# Altium schematic symbol library DT10965_MOTOR_CONTROLLER.SCHLIB: 85 symbols (part 2 of 2)
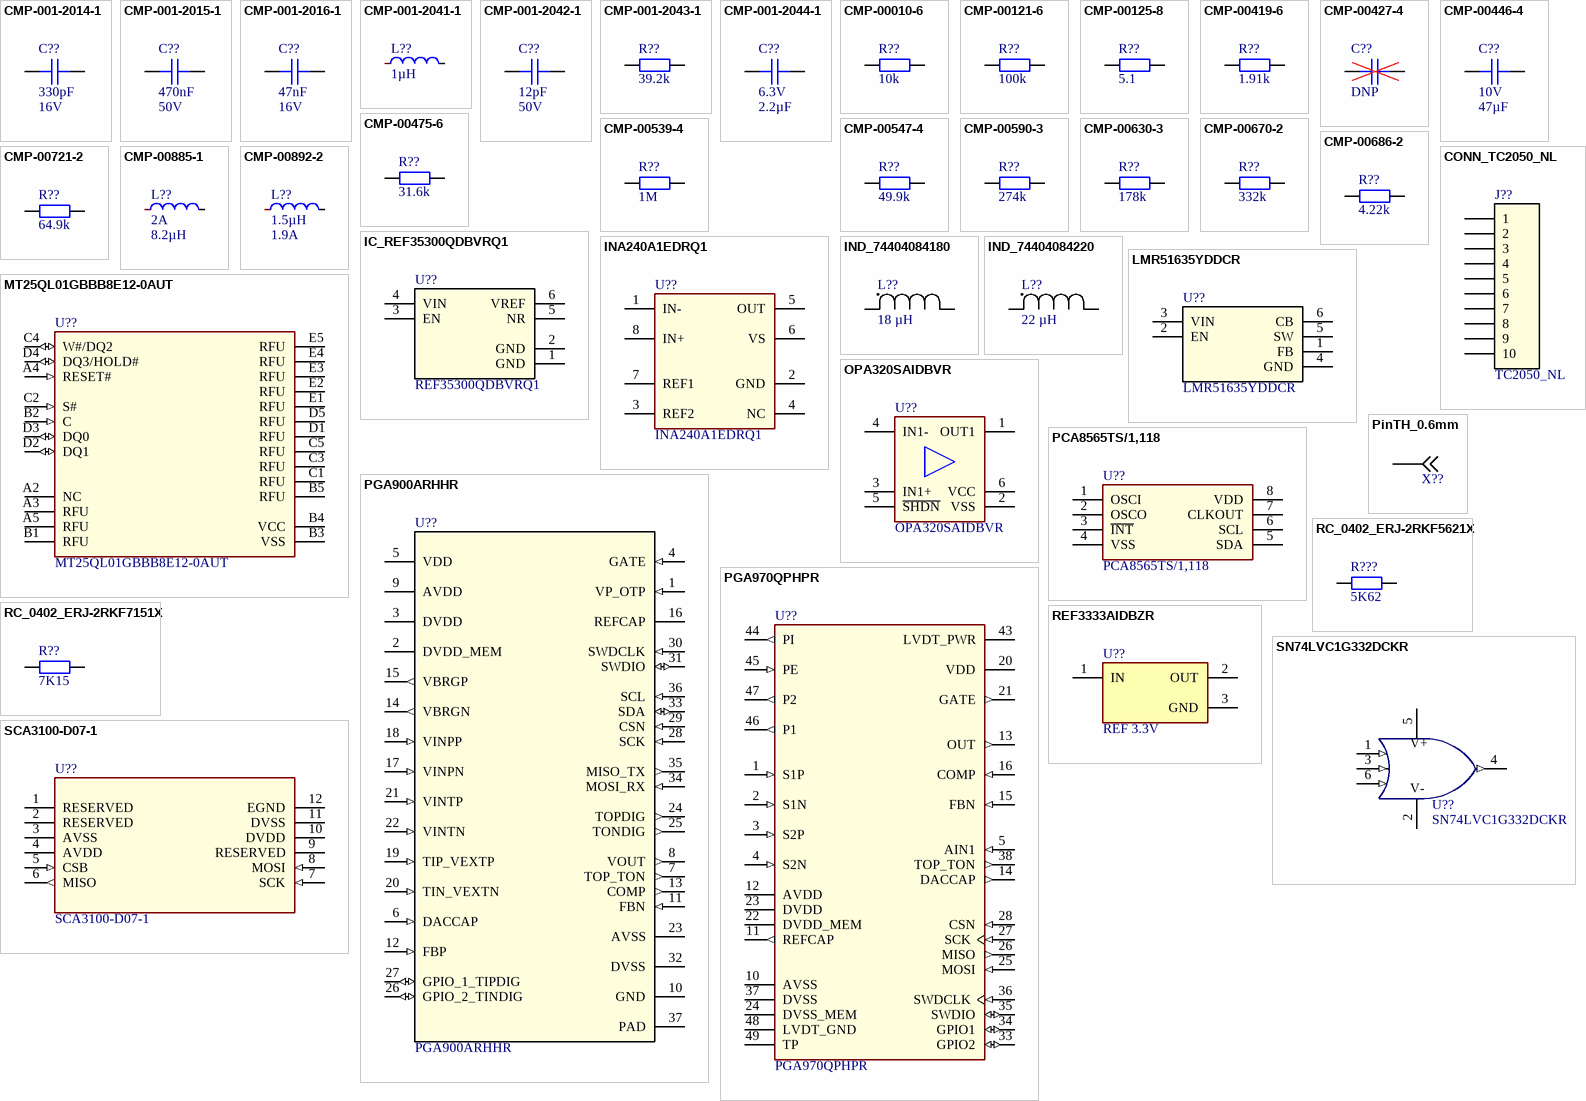
[diagram p3: symbols CMP-001-2014-1 to SN74LVC1G332DCKR]

## CMP-00670-2
designator R??, comment Resistance: 332k  (hidden comment: RC0402FR-07332KL)
RES 332K OHM 1% 1/16W 0402; Manufacturer: YAGEO; Op Temp max: 155°C; Temperature Coefficient: ±100ppm; Power: 63mW; Op Temp min: -55°C; Size: 1.00mm x 0.50mm; ComponentLink1Description: Datasheet; Composition: Thick Film; Package: 0402 (1005 Metric); Height max: 400µm; Ratings: -; ComponentLink2Description: Mouser; ComponentLink3Description: Digikey; MPN: RC0402FR-07332KL; ComponentLink1URL: https://www.yageo.com/upload/media/product/productsearch/datasheet/rchip/PYu-RC_Group_51_RoHS_L_12.pdf; ComponentLink2URL: https://eu.mouser.com/ProductDetail/YAGEO/RC0402FR-07332KL?qs=5YWhraou11DzMN0bHRRHtQ%3D%3D; ComponentLink3URL: https://www.digikey.com/en/products/detail/yageo/RC0402FR-07332KL/726595?s=N4IgTCBcDaIEoGEAMAWJYBicC0SDsAzAWANIAyIAugL5A; Mounting Type: SM; Tolerance: 1%; Component Type: Chip Resistor
footprint RESC100X50X40L25 (EIA 0402 (1005) T0.40 1.00x0.50x0.40)
pins: 1, 2

## CMP-00686-2
designator R??, comment Resistance: 4.22k  (hidden comment: RC0402FR-074K22L)
RES 4.22K OHM 1% 1/16W 0402; Manufacturer: YAGEO; Temperature Coefficient: ±100ppm; Op Temp max: 155°C; Op Temp min: -55°C; Power: 63mW; Height max: 400µm; Tolerance: 1%; Mounting Type: SM; ComponentLink2URL: https://eu.mouser.com/ProductDetail/YAGEO/RC0402FR-074K22L?qs=UOUeRUa%252B8WlIkeLfnYGqDQ%3D%3D; ComponentLink3URL: https://www.digikey.com/en/products/detail/yageo/RC0402FR-074K22L/5281032?s=N4IgTCBcDaIEoGEAMAWJYBicC0SDsKA0mGADIgC6AvkA; ComponentLink2Description: Mouser; Package: 0402 (1005 Metric); ComponentLink3Description: Digikey; MPN: RC0402FR-074K22L; Ratings: -; ComponentLink1Description: Datasheet; ComponentLink1URL: https://www.yageo.com/upload/media/product/productsearch/datasheet/rchip/PYu-RC_Group_51_RoHS_L_12.pdf; Composition: Thick Film; Size: 1.00mm x 0.50mm; Component Type: Chip Resistor
footprint RESC100X50X40L25 (EIA 0402 (1005) T0.40 1.00x0.50x0.40)
pins: 1, 2

## CMP-00721-2
designator R??, comment Resistance: 64.9k  (hidden comment: RC0402FR-0764K9L)
RES 64.9K OHM 1% 1/16W 0402; Manufacturer: YAGEO; Temperature Coefficient: ±100ppm; Op Temp min: -55°C; Power: 63mW; Op Temp max: 155°C; Tolerance: 1%; Package: 0402 (1005 Metric); ComponentLink2URL: https://eu.mouser.com/ProductDetail/YAGEO/RC0402FR-0764K9L?qs=Is6ZsIPfHkbVUkOpst8WdA%3D%3D; MPN: RC0402FR-0764K9L; ComponentLink1URL: https://www.yageo.com/upload/media/product/productsearch/datasheet/rchip/PYu-RC_Group_51_RoHS_L_12.pdf; ComponentLink2Description: Mouser; ComponentLink3Description: Digikey; ComponentLink3URL: https://www.digikey.com/en/products/detail/yageo/RC0402FR-0764K9L/726649?s=N4IgTCBcDaIEoGEAMAWJYBicC0SDsAbCgNICcAMiALoC%2BQA; Composition: Thick Film; ComponentLink1Description: Datasheet; Mounting Type: SM; Ratings: -; Size: 1.00mm x 0.50mm; Height max: 400µm; Component Type: Chip Resistor
footprint RESC100X50X40L25 (EIA 0402 (1005) T0.40 1.00x0.50x0.40)
pins: 1, 2

## CMP-00885-1
designator L??, comment I: 2A  Inductance: 8.2µH  (hidden comment: SRP4020TA-8R2M)
FIXED IND 8.2UH 2A 180 MOHM SMD; Manufacturer: Bourns Inc.; Type: Drum Core, Wirewound; Op Temp min: -40°C; Material - Core: Carbonyl Powder; DCR: 0.18; Op Temp max: 150°C; Tolerance: 20%; Isat: 2.5A; Fsr: 21MHz; Shielding: Shielded; Ratings: AEC-Q200; ComponentLink3Description: Digikey; ComponentLink2Description: Mouser; Height max: 2mm; Lead Spacing: 0mm; ComponentLink1Description: Datasheet; Package: 2-SMD; ComponentLink3URL: https://www.digikey.com/en/products/detail/bourns-inc/SRP4020TA-8R2M/4901009?s=N4IgTCBcDaIMoCUAKAWADGNAVAggWgA4EwBZEAXQF8g; ComponentLink2URL: https://eu.mouser.com/ProductDetail/Bourns/SRP4020TA-8R2M?qs=Ph8%2FHnX6CQwwXiBs8JjSfQ%3D%3D; Size: 4.45mm x 4.06mm; MPN: SRP4020TA-8R2M; ComponentLink1URL: https://www.bourns.com/docs/Product-Datasheets/SRP4020TA.pdf; Mounting Type: SM; Component Type: Fixed Inductors
footprint BOURNS_SRP4020TA (Inductor 4.45x4.06 h2.00 Bourns Inc.)
pins: 1, 2

## CMP-00892-2
designator L??, comment Inductance: 1.5µH  I: 1.9A  (hidden comment: VLS201612CX-1R5M-1)
FIXED IND 1.5UH 1.9A 89MOHM SMD; Manufacturer: TDK Corporation; Op Temp max: 105°C; Shielding: Shielded; DCR: 89m; Type: Drum Core, Wirewound; Material - Core: Ferrite; Tolerance: 20%; Op Temp min: -40°C; Fsr: 0Hz; Isat: 1.62A; Height max: 1.2mm; Size: 2.00mm x 1.60mm; ComponentLink3URL: https://www.digikey.com/en/products/detail/tdk-corporation/VLS201612CX-1R5M-1/5169766; ComponentLink2Description: Mouser; ComponentLink1Description: Datasheet; Mounting Type: SM; Lead Spacing: 0mm; MPN: VLS201612CX-1R5M-1; ComponentLink3Description: Digikey; Package: Nonstandard; ComponentLink2URL: https://eu.mouser.com/ProductDetail/TDK/VLS201612CX-1R5M-1?qs=1mbolxNpo8ckwscKPJipMQ%3D%3D; Ratings: -; ComponentLink1URL: https://product.tdk.com/en/search/inductor/inductor/smd/info?part_no=VLS201612CX-1R5M-1&utm_source=inductor_commercial_power_vls201612cx-1_en.pdf&utm_medium=catalog; Component Type: Fixed Inductors
footprint TDK_VLS201612 (Inductor 2.00x1.60 h1.20 TDK Corporation)
pins: 1, 2

## CONN_TC2050_NL
designator J??, comment TC2050_NL
PLUG-OF-NAILS 10-PIN W/O LEGS 8"; Manufacturer: Tag-Connect LLC; MPN: TC2050; Series: Plug-Of-Nails™; ComponentLink1Description: Datasheet; ComponentLink1URL: https://www.tag-connect.com/wp-content/uploads/bsk-pdf-manager/TC2050-IDC-NL_Datasheet_8.pdf; ComponentLink2Description: DigiKey; ComponentLink2URL: https://www.digikey.pl/en/products/detail/tag-connect-llc/TC2030-IDC/4571121
footprint CONN__TAG_TC2050-IDC-NL
pins: 1, 2, 3, 4, 5, 6, 7, 8, 9, 10

## IC_REF35300QDBVRQ1
designator U??, comment REF35300QDBVRQ1
IC VREF SERIES SOT23-6; Mfr_Name: Texas Instruments; Output Type: Fixed; Voltage - Output (Min/Fixed): 3V; Current - Output: 10 mA; Tolerance: ±0.05%; Temperature Coefficient: 15ppm/°C; Noise - 0.1Hz to 10Hz: 3.8ppmp-p; Noise - 10Hz to 10kHz: 0.7ppmrms; Voltage - Input: 3.25V ~ 6V; Current - Supply: 2.6µA; MPN: REF35300QDBVRQ1; Reference Type: Series; ComponentLink1Description: Datasheet; ComponentLink1URL: https://www.ti.com/lit/ds/symlink/ref35-q1.pdf?ts=1750582135074&ref_url=https%253A%252F%252Fwww.ti.com%252Fproduct%252FREF35-Q1; ComponentLink2Description: DigiKey; ComponentLink2URL: https://www.digikey.com/en/products/detail/texas-instruments/REF35300QDBVRQ1/21598116?s=N4IgTCBcDaIEoFEBiBmArCgDJgigEQCEA1OHARgAIQBdAXyA; ComponentLink3Description: Mouser; ComponentLink3URL: https://eu.mouser.com/ProductDetail/Texas-Instruments/REF35300QDBVRQ1?qs=HoCaDK9Nz5eVknlU2N7cQg%3D%3D; Operating Temperature (MIN): -40°C (TA); Operating Temperature (MAX): +125°C (TA); Ratings: AEC-Q100; Mounting Type: SM; Package / Case: SOT-23-6
footprint SOT23-6_DBV_TEX
pins: 1 GND, 2 GND, 3 EN, 4 VIN, 5 NR, 6 VREF

## INA240A1EDRQ1
designator U??
IC CURRENT SENSE 1 CIRCUIT 8SOIC; Manufacturer: Texas Instruments; MPN: INA240A1EDRQ1
footprint SOIC8P127_490X600X175L70X41 (SO-8 4.9X6X1.75 p1.27 (JEDEC MS-012-AA))
pins: 1 IN-, 2 GND, 3 REF2, 4 NC, 5 OUT, 6 VS, 7 REF1, 8 IN+

## IND_74404084180
designator L??, comment Inductance: 18 µH  (hidden comment: 74404084180)
FIXED IND 18UH 2.4A 53 MOHM SMD; Manufacturer: Würth Elektronik; Current - Saturation (Isat): 3.2A; Shielding: Shielded; DC Resistance (DCR): 53mOhm; Frequency - Self Resonant: 16.5MHz; Inductance Frequency - Test: 100 kHz; Type: Drum Core, Wirewound; Material - Core: Ferrite; Tolerance: ±20%; MPN: 74404084180; Current Rating (Amps): 2.4 A; ComponentLink1Description: DigiKey; ComponentLink1URL: https://www.digikey.at/en/products/detail/w%C3%BCrth-elektronik/74404084180/4865714; ComponentLink2Description: Datasheet; ComponentLink2URL: https://www.we-online.com/components/products/datasheet/74404084180.pdf; Mounting Type: SM; Ratings: AEC-Q200; Q @ Freq: -; ComponentLink3Description: Mouser; ComponentLink3URL: https://eu.mouser.com/ProductDetail/Wurth-Elektronik/74404084180?qs=Zt3UNFD9mQi7%2FFsJHsfi3g%3D%3D; Size / Dimension: 8.00mm x 8.00mm); Height - Seated (Max: 4.20mm
footprint WE-LQS_8040 (SMD Power Inductor, 2-Leads, body 8x8mm)
pins: 1, 2

## IND_74404084220
designator L??, comment Inductance: 22 µH  (hidden comment: 74404084220)
FIXED IND 22UH 2.1A 69 MOHM SMD; Manufacturer: Würth Elektronik; Current - Saturation (Isat): 3.3A; Shielding: Shielded; DC Resistance (DCR): 69mOhm; Frequency - Self Resonant: 9.5MHz; Inductance Frequency - Test: 100 kHz; Type: Drum Core, Wirewound; Material - Core: Ferrite; Tolerance: ±20%; MPN: 74404084220; Current Rating (Amps): 2.1 A; ComponentLink1Description: DigiKey; ComponentLink1URL: https://www.digikey.at/en/products/detail/w%C3%BCrth-elektronik/74404084220/4865715; ComponentLink2Description: Datasheet; ComponentLink2URL: https://www.we-online.com/components/products/datasheet/74404084180.pdf; Mounting Type: SM; Ratings: AEC-Q200; Q @ Freq: -; ComponentLink3Description: Mouser; ComponentLink3URL: https://eu.mouser.com/ProductDetail/Wurth-Elektronik/74404084220?qs=Zt3UNFD9mQj6g2r9g%252BlaYA%3D%3D; Size / Dimension: 8.00mm x 8.00mm); Height - Seated (Max: 4.20mm
footprint WE-LQS_8040 (SMD Power Inductor, 2-Leads, body 8x8mm)
pins: 1, 2

## LMR51635YDDCR
designator U??
SIMPLE SWITCHER SYNCHRONOUS BUCK; Manufacturer: Texas Instruments; Function: Step-Down; Output Type: Adjustable; Voltage - Input (Min): 4.3V; Voltage - Input (Max): 60V; Voltage - Output (Min/Fixed): 0.8V; Voltage - Output (Max): 30V; Current - Output: 3.5A; Frequency - Switching: 1.1MHz; Synchronous Rectifier: Yes; MPN: LMR51635YDDCR; Topology: Buck; Operating Temperature (MIN): -40°C  (TJ); Operating Temperature (MAX): 150°C (TJ); Mounting Type: SM; Package / Case: SOT-23-6 Thin, TSOT-23-6; ComponentLink1Description: Datasheet; ComponentLink1URL: https://www.ti.com/lit/ds/symlink/lmr51625.pdf?ts=1742888310253&ref_url=https%253A%252F%252Fwww.ti.com%252Fsitesearch%252Fen-us%252Fdocs%252Funiversalsearch.tsp%253FlangPref%253Den-US%2526nr%253D3%2526searchTerm%253DLMR51625XDDCR; ComponentLink2Description: DigiKey; ComponentLink2URL: https://www.digikey.at/en/products/detail/texas-instruments/LMR51635YDDCR/25991362?s=N4IgTCBcDaIDIFkBKBWAjANgMwoJoBF8BhJEAXQF8g; ComponentLink3Description: Mouser; ComponentLink3URL: https://eu.mouser.com/ProductDetail/Texas-Instruments/LMR51635YDDCR?qs=efUn273yAhf6vdsp91a46w%3D%3D
footprint DDC0006A-MFG
pins: 1 FB, 2 EN, 3 VIN (power), 4 GND (power), 5 SW (power), 6 CB (power)

## MT25QL01GBBB8E12-0AUT
designator U??
IC FLASH 1GBIT SPI 24TPBGA; Manufacturer: Micron Technology Inc.; MPN: MT25QL01GBBB8E12-0AUT
footprint 24-T-PBGA (6x8)
pins: A2 NC, A3 RFU, A4 RESET# (in), A5 RFU, B1 RFU, B2 C (in), B3 VSS (power), B4 VCC (power), B5 RFU, C1 RFU, C2 S# (in), C3 RFU, C4 W#/DQ2 (io), C5 RFU, D1 RFU, D2 DQ1 (io), D3 DQ0 (io), D4 DQ3/HOLD# (io), D5 RFU, E1 RFU, E2 RFU, E3 RFU, E4 RFU, E5 RFU

## OPA320SAIDBVR
designator U??
CMOS Amplifier 1 Circuit Rail-to-Rail SOT-23-6; Manufacturer: Texas Instruments; MPN: OPA320SAIDBVR
footprint SOT-23-6
pins: 1 OUT1, 2 VSS, 3 IN1+, 4 IN1-, 5 ~{SHDN}, 6 VCC

## PCA8565TS/1,118
designator U??
IC RTC CLK/CALENDAR I2C 8TSSOP; Manufacturer: NXP USA Inc.; MPN: PCA8565TS/1,118
footprint MINISOIC-8 (MINISOIC, 8-Leads, Body 3,00x3,00mm, Pitch 0,65mm, IPC Medium Density)
pins: 1 OSCI, 2 OSCO, 3 ~{INT}, 4 VSS, 5 SDA, 6 SCL, 7 CLKOUT, 8 VDD

## PGA900ARHHR
designator U??
IC PROG SENSOR SGNL COND 36VQFN; Manufacturer: Texas Instruments; MPN: PGA900ARHHR
footprint 36VQFN (PGA900ARHHR)
pins: 1 VP_OTP (in), 2 DVDD_MEM (power), 3 DVDD (power), 4 GATE (in), 5 VDD (power), 6 DACCAP (in), 7 TOP_TON (out), 8 VOUT (out), 9 AVDD (power), 10 GND (power), 11 FBN (in), 12 FBP (in), 13 COMP (out), 14 VBRGN (out), 15 VBRGP (out), 16 REFCAP, 17 VINPN (in), 18 VINPP (in), 19 TIP_VEXTP (in), 20 TIN_VEXTN (in), 21 VINTP (in), 22 VINTN (in), 23 AVSS (power), 24 TOPDIG (out), 25 TONDIG (out), 26 GPIO_2_TINDIG (io), 27 GPIO_1_TIPDIG (io), 28 SCK (in), 29 CSN (in), 30 SWDCLK (in), 31 SWDIO (io), 32 DVSS (power), 33 SDA (io), 34 MOSI_RX (in), 35 MISO_TX (out), 36 SCL (in), 37 PAD (power)

## PGA970QPHPR
designator U??
IC SGNL CONDITIONER LVDT 48HTQFP; Manufacturer: Texas Instruments; MPN: PGA970QPHPR
footprint 48-HTQFP (7x7)
pins: 1 S1P (in), 2 S1N (in), 3 S2P (in), 4 S2N (in), 5 AIN1 (in), 10 AVSS (power), 11 REFCAP (out), 12 AVDD (power), 13 OUT (out), 14 DACCAP (out), 15 FBN (in), 16 COMP (in), 20 VDD (power), 21 GATE (out), 22 DVDD_MEM (power), 23 DVDD (power), 24 DVSS_MEM (power), 25 MOSI (in), 26 MISO (out), 27 SCK (in), 28 CSN (in), 33 GPIO2 (io), 34 GPIO1 (io), 35 SWDIO (io), 36 SWDCLK (in), 37 DVSS (power), 38 TOP_TON (out), 43 LVDT_PWR (power), 44 PI (out), 45 PE (in), 46 P1 (out), 47 P2 (out), 48 LVDT_GND (power), 49 TP (power)

## PinTH_0.6mm
designator X??, comment PIN-TH-0.6mm  (value not drawn)
Pin 0.6mm diameter for 26AWG; Current Rating (Amps): 3A; Voltage Rating: 250V; ComponentLink1Description: DigiKey; ComponentLink2Description: Datasheet; Termination: Solder; Mounting Type: TH; Diameter: 0.6mm; Contact Type: Male Pin; ComponentLink3Description: Mouser
footprint PIN-TH-0.6mm
pins: 1

## RC_0402_ERJ-2RKF5621X
designator R???, comment Resistance: 5K62  (hidden comment: ERJ-2RKF5621X)
RES SMD 5.62K OHM 1% 1/10W 0402; Manufacturer: Panasonic Electronic Components; Temperature Coefficient: ±100ppm/°C; Power: 0.1W, 1/10W; Op Temp min: -55°C; Op Temp max: 155°C; Ratings: Automotive AEC-Q200; Package: 0402 (1005 Metric); MPN: ERJ-2RKF5621X; Size: 1.00mm x 0.50mm; ComponentLink1Description: Datasheet; ComponentLink3Description: Digikey; ComponentLink2URL: https://eu.mouser.com/ProductDetail/Panasonic/ERJ-2RKF5621X?qs=YMBIwoNQYdVW%2FAKb0KIR9A%3D%3D; Mounting Type: SM; Composition: Thick Film; ComponentLink3URL: https://www.digikey.at/en/products/detail/panasonic-electronic-components/ERJ-2RKF5621X/192390?s=N4IgTCBcDaIKICUBSBaMCDSAxArANjAEYANEAXQF8g; Tolerance: 1%; Height max: 0.40mm; ComponentLink2Description: Mouser; ComponentLink1URL: https://industrial.panasonic.com/cdbs/www-data/pdf/RDA0000/AOA0000C304.pdf; Component Type: Chip Resistor
footprint RC0402N_PAN
pins: 1, 2

## RC_0402_ERJ-2RKF7151X
designator R??, comment Resistance: 7K15  (hidden comment: ERJ-2RKF7151X)
RES SMD 7.15K OHM 1% 1/10W 0402; Manufacturer: Panasonic Electronic Components; Temperature Coefficient: ±100ppm/°C; Power: 0.1W, 1/10W; Op Temp min: -55°C; Op Temp max: 155°C; Ratings: Automotive AEC-Q200; Package: 0402 (1005 Metric); MPN: ERJ-2RKF7151X; Size: 1.00mm x 0.50mm; ComponentLink1Description: Datasheet; ComponentLink3Description: Digikey; ComponentLink2URL: https://eu.mouser.com/ProductDetail/Panasonic/ERJ-2RKF7151X?qs=iBwFsHVUAOeT%2FIodbHv05A%3D%3D; Mounting Type: SM; Composition: Thick Film; ComponentLink3URL: https://www.digikey.at/en/products/detail/panasonic-electronic-components/ERJ-2RKF7151X/192455?s=N4IgTCBcDaIKICUBSBaMCDSAxA7ARgFY8ANEAXQF8g; Tolerance: 1%; Height max: 0.40mm; ComponentLink2Description: Mouser; ComponentLink1URL: https://industrial.panasonic.com/cdbs/www-data/pdf/RDA0000/AOA0000C304.pdf; Component Type: Chip Resistor
footprint RC0402N_PAN
pins: 1, 2

## REF3333AIDBZR
designator U??, comment REF 3.3V
IC VREF SERIES 0.15% SOT23-3; Manufacturer: Texas Instruments; MPN: REF3333AIDBZR
footprint SOT-23
pins: 1 IN, 2 OUT, 3 GND

## SCA3100-D07-1
designator U??
ACCELEROMETER 6G SPI 12SMD; Manufacturer: Murata Electronics; MPN: SCA3100-D07-1
footprint SCA3100-D07-1 (12-SMD)
pins: 1 RESERVED (power), 2 RESERVED (power), 3 AVSS (power), 4 AVDD (power), 5 CSB (in), 6 MISO (out), 7 SCK (in), 8 MOSI (in), 9 RESERVED, 10 DVDD (power), 11 DVSS (power), 12 EGND (power)

## SN74LVC1G332DCKR
designator U??
IC GATE OR 1CH 3-INP SC70-6; Manufacturer: Texas Instruments; MPN: SN74LVC1G332DCKR
footprint SC70-6 (SC70-6, 6-Leads, Body 2,00x2,10mm, Pitch 0,65mm, IPC Medium Density)
pins: 1 A (in), 2 GND (power), 3 B (in), 4 Y (out), 5 VCC (power), 6 C (in)
text: V+; V-

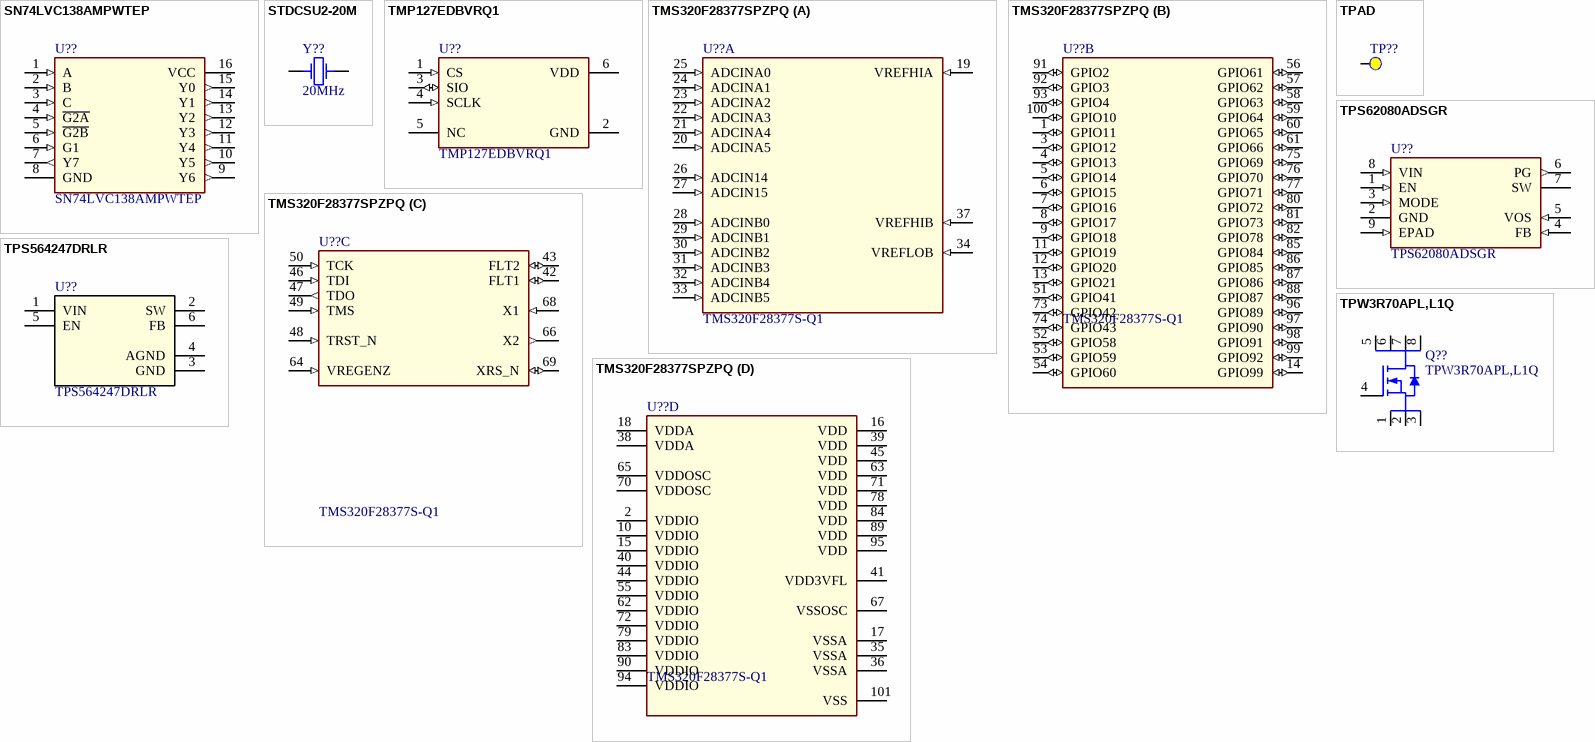
[diagram p2: symbols SN74LVC138AMPWTEP to TPW3R70APL,L1Q]

## SN74LVC138AMPWTEP
designator U??
IC DECODER/DEMUX 1X3:8 16-TSSOP; Manufacturer: Texas Instruments; MPN: SN74LVC138AMPWTEP
footprint TSSOP16
pins: 1 A (in), 2 B (in), 3 C (in), 4 ~{G2A} (in), 5 ~{G2B} (in), 6 G1 (in), 7 Y7 (out), 8 GND (power), 9 Y6 (out), 10 Y5 (out), 11 Y4 (out), 12 Y3 (out), 13 Y2 (out), 14 Y1 (out), 15 Y0 (out), 16 VCC (power)

## STDCSU2-20M
designator Y??, comment 20MHz
CRYSTAL 20.0000MHZ 8PF SMD; Manufacturer: NDK (NIHON DEMPA KOGYO CO., LTD); MPN: STDCSU2-20M
footprint NX5032GA
pins: 1, 2

## TMP127EDBVRQ1
designator U??
AUTOMOTIVE 0.8C SPI TEMPERATURE; Manufacturer: Texas Instruments; MPN: TMP127EDBVRQ1
footprint SOT-23-6
pins: 1 CS (in), 2 GND (power), 3 SIO (io), 4 SCLK (in), 5 NC, 6 VDD (power)

## TMS320F28377SPZPQ
designator U??, comment TMS320F28377S-Q1
IC MCU 32BIT 1MB FLASH 100HTQFP; MPN: TMS320F28377SPZPQ; Manufacturer: Texas Instruments
footprint 100-HTQFP (14x14)
part A pins: 19 VREFHIA (in), 20 ADCINA5 (in), 21 ADCINA4 (in), 22 ADCINA3 (in), 23 ADCINA2 (in), 24 ADCINA1 (in), 25 ADCINA0 (in), 26 ADCIN14 (in), 27 ADCIN15 (in), 28 ADCINB0 (in), 29 ADCINB1 (in), 30 ADCINB2 (in), 31 ADCINB3 (in), 32 ADCINB4 (in), 33 ADCINB5 (in), 34 VREFLOB (in), 37 VREFHIB (in)
part B pins: 1 GPIO11 (io), 3 GPIO12 (io), 4 GPIO13 (io), 5 GPIO14 (io), 6 GPIO15 (io), 7 GPIO16 (io), 8 GPIO17 (io), 9 GPIO18 (io), 11 GPIO19 (io), 12 GPIO20 (io), 13 GPIO21 (io), 14 GPIO99 (io), 51 GPIO41 (io), 52 GPIO58 (io), 53 GPIO59 (io), 54 GPIO60 (io), 56 GPIO61 (io), 57 GPIO62 (io), 58 GPIO63 (io), 59 GPIO64 (io), 60 GPIO65 (io), 61 GPIO66 (io), 73 GPIO42 (io), 74 GPIO43 (io), 75 GPIO69 (io), 76 GPIO70 (io), 77 GPIO71 (io), 80 GPIO72 (io), 81 GPIO73 (io), 82 GPIO78 (io), 85 GPIO84 (io), 86 GPIO85 (io), 87 GPIO86 (io), 88 GPIO87 (io), 91 GPIO2 (io), 92 GPIO3 (io), 93 GPIO4 (io), 96 GPIO89 (io), 97 GPIO90 (io), 98 GPIO91 (io), 99 GPIO92 (io), 100 GPIO10 (io)
part C pins: 42 FLT1 (io), 43 FLT2 (io), 46 TDI (in), 47 TDO (out), 48 TRST_N (in), 49 TMS (in), 50 TCK (in), 64 VREGENZ (in), 66 X2 (out), 68 X1 (in), 69 XRS_N (io)
part D pins: 2 VDDIO (power), 10 VDDIO (power), 15 VDDIO (power), 16 VDD (power), 17 VSSA (power), 18 VDDA (power), 35 VSSA (power), 36 VSSA (power), 38 VDDA (power), 39 VDD (power), 40 VDDIO (power), 41 VDD3VFL (power), 44 VDDIO (power), 45 VDD (power), 55 VDDIO (power), 62 VDDIO (power), 63 VDD (power), 65 VDDOSC (power), 67 VSSOSC (power), 70 VDDOSC (power), 71 VDD (power), 72 VDDIO (power), 78 VDD (power), 79 VDDIO (power), 83 VDDIO (power), 84 VDD (power), 89 VDD (power), 90 VDDIO (power), 94 VDDIO (power), 95 VDD (power), 101 VSS (power)

## TPAD
designator TP??  (value not drawn)  (no BOM)
Test Pad, SMD; Group: Test point
footprint PAD_2.0R (Pad, SMD, R=2.0 mm)
footprint PAD_1.5R (Pad, SMD, R=1.5 mm)
footprint PAD_1.0R (Pad, SMD, R=1.0 mm)
footprint PAD_1.5x1.5 (Pad, SMD, 1.5x1.5 mm)
pins: 1 TPoint

## TPS62080ADSGR
designator U??
IC REG BUCK ADJ 1.2A 8WSON; Manufacturer: Texas Instruments; MPN: TPS62080ADSGR
footprint WSON (8) 2*2mm
pins: 1 EN (in), 2 GND (power), 3 MODE (in), 4 FB (in), 5 VOS (in), 6 PG (out), 7 SW (power), 8 VIN (in), 9 EPAD (in)

## TPS564247DRLR
designator U??
IC REG BUCK ADJ 4A SOT563; Manufacturer: Texas Instruments; Function: Step-Down; Output Type: Adjustable; Voltage - Input (Min): 3V; Voltage - Input (Max): 16V; Voltage - Output (Min/Fixed): 0.6V; Voltage - Output (Max): 7V; Frequency - Switching: 1.2MHz; MPN: TPS564247DRLR; Topology: Buck; Current - Output: 4A; Operating Temperature (MIN): -40°C (TJ); Operating Temperature (MAX): 125°C (TJ); Mounting Type: SM; Package / Case: SOT-563, SOT-666; ComponentLink1Description: Datsheet; ComponentLink1URL: https://www.ti.com/lit/ds/symlink/tps564242.pdf?ts=1750029010480; ComponentLink2Description: DigiKey; ComponentLink2URL: https://www.digikey.at/en/products/detail/texas-instruments/TPS564247DRLR/16585672?s=N4IgTCBcDaICoAUDKBWAbAFjBg7CAugL5A; ComponentLink3Description: Mouser; ComponentLink3URL: https://eu.mouser.com/ProductDetail/Texas-Instruments/TPS564247DRLR?qs=tlsG%2FOw5FFiLH60bcMvlFQ%3D%3D
footprint SOT5x3-6_DRL_TEX
pins: 1 VIN, 2 SW, 3 GND, 4 AGND, 5 EN, 6 FB

## TPW3R70APL,L1Q
designator Q??
PB-F POWER MOSFET TRANSISTOR DSO; Manufacturer: Toshiba Semiconductor and Storage; MPN: TPW3R70APL,L1Q
footprint TOSHIBA_2-5Q1A (PDFN-8 5.00x6.00 h0.83 p1.27 DSOP Advance)
pins: 1, 2, 3, 4, 5 3, 6, 7, 8